# Altium schematic symbol library 8.2k resistor 0805.SchLib: 1 symbol
Pins are listed as number, name and electrical type; pins without a type are passive.

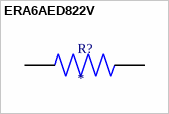
[diagram p0: symbol ERA6AED822V]

## ERA6AED822V
designator R?
MP: ERA6AED822V; Value: *; Availability: Unavailable; Price: None; Package: None
footprint RES_ERA6AED822V
pins: 1, 2